# Altium footprint library SamacSys.PcbLib: 1008 footprints (part 8 of 63)
Each footprint in its own frame and in the unit in brackets; x right, y up, seen from the top. Pads: shape width x height; smd on the part's side, far side on the other; paste and mask are expansions set on the pad; w line width, h text height; cw(c..) or ccw(c..) is an arc to the next point about the centre after c.
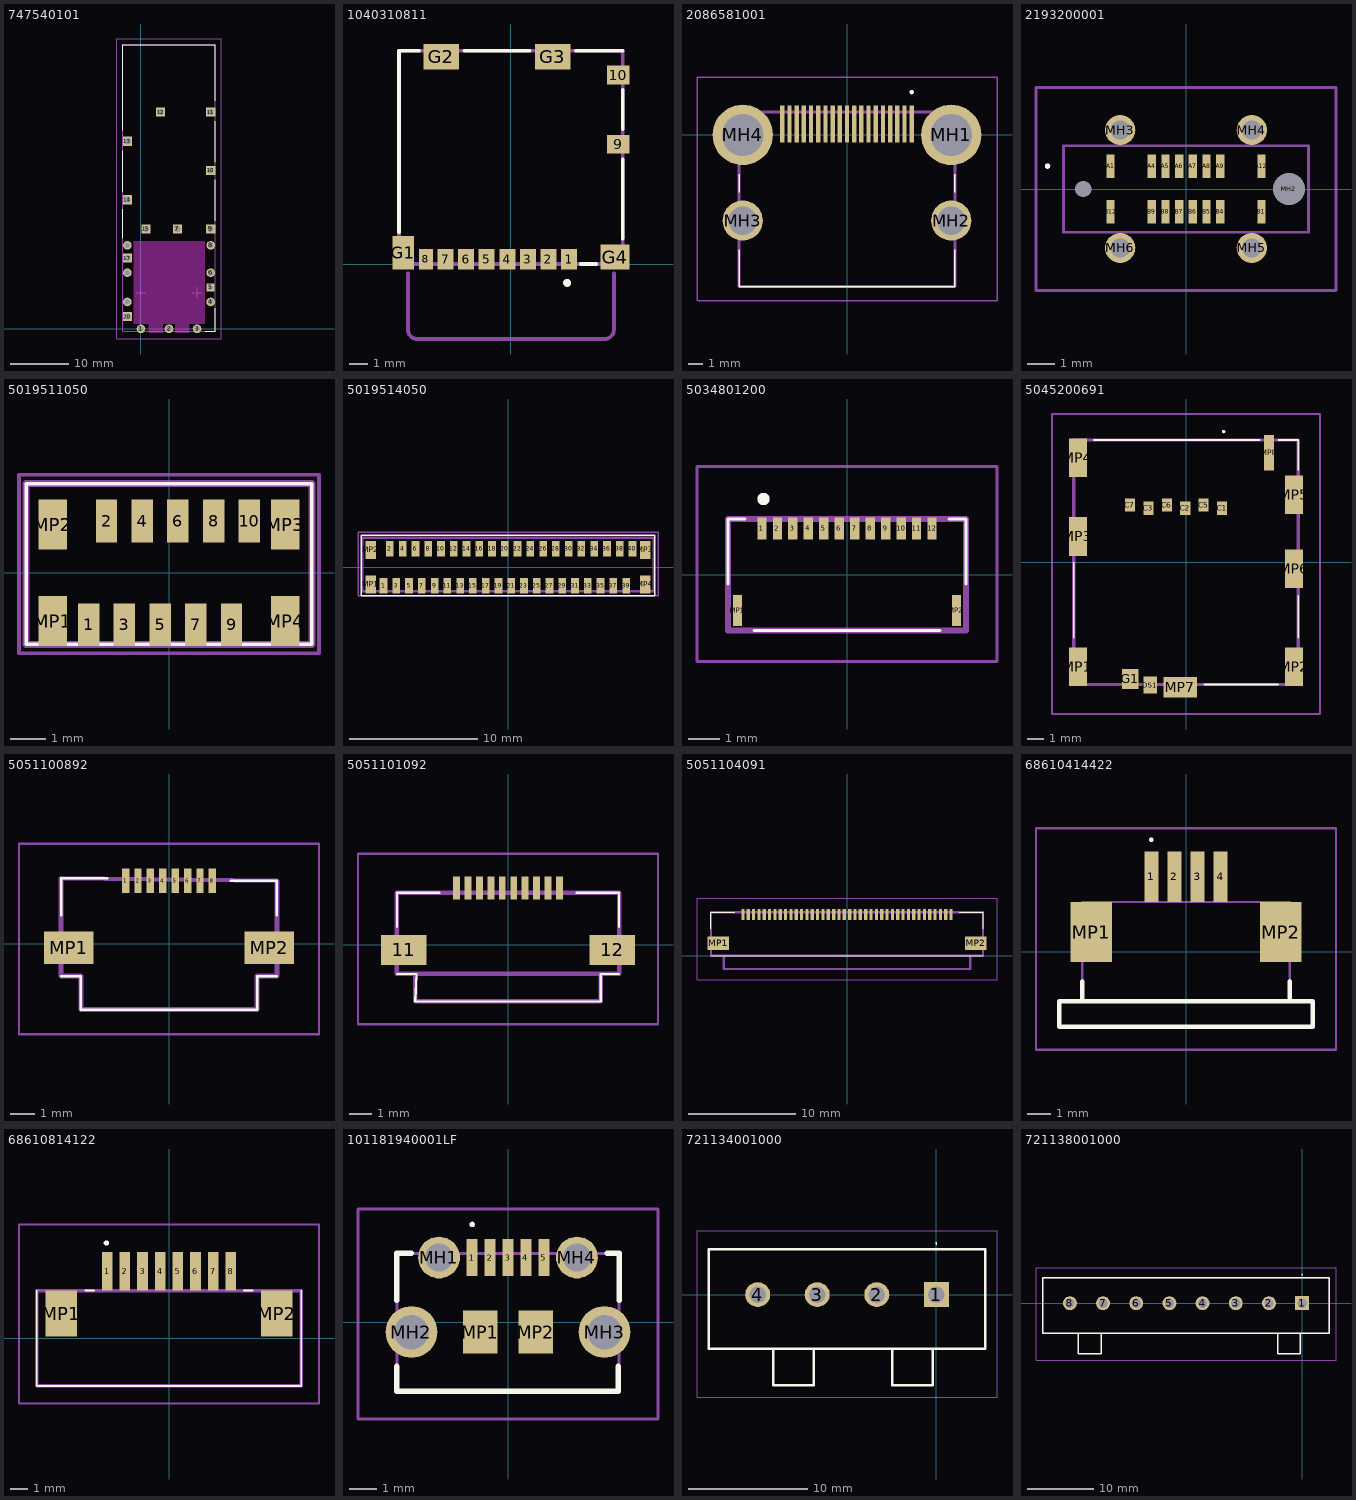
[diagram p7: the footprints below, top view; thin cyan lines are the x and y axes]

## 747540101 [mm]
pads (20):
  round 1.478 hole 0.95: 1(0,0) 2(4.8,0) 3(9.6,0) 4(11.93,4.6) 6(11.93,9.6) 8(11.93,14.3) 16(-2.32,14.3) 18(-2.32,9.6) 19(-2.32,4.6)
  rect 1.381x1.381 hole 0.85: 5(11.93,7.1)
  rect 1.575x1.575 hole 1.05: 7(6.25,17.1) 9(11.93,17.1) 10(11.93,27.1) 11(11.93,37.1) 12(3.35,37.1) 13(-2.32,32.1) 14(-2.32,22.1) 15(0.85,17.1) 17(-2.32,12.1) 20(-2.32,2.1)
Top Layer keep-out:
  rectangle: 5.8,-0.7 8.3,0.8
  rectangle: 1.3,-0.7 3.8,0.8
  rectangle: -1.25,0.8 11,15
Top Overlay:
  lines w0.2: -3.15,15.5 -3.15,20.5 ; -3.15,23.5 -3.15,30.5 ; -3.15,34 -3.15,48.6 12.75,48.6 12.75,39 ; 11,-0.4 12.75,-0.4 12.75,3.5 ; 12.75,18.5 12.75,25.5 ; 12.75,28.5 12.75,35.5
Top Assembly:
  lines w0.1: -0.8,6.2 0.8,6.2 ; 0,5.4 0,7 ; 8.8,6.2 10.4,6.2 ; 9.6,5.4 9.6,7
  text "pin1" at 10.475,12.31 h2
  text "pin20" at 10.475,1.053 h2
Assembly:
  lines w0.1: -3.15,-0.4 12.75,-0.4 12.75,48.6 -3.15,48.6 -3.15,-0.4
Countryard:
  lines w0.1: -4.15,-1.739 13.75,-1.739 13.75,49.6 -4.15,49.6 -4.15,-1.739
3D body "747540101.stp": height 10.65, standoff -2.6, extent -3.039,-0.36 12.859,48.635

## 1040310811 [mm]
pads (14):
  rect 0.85x1.1 smd: 1(3.105,0.25) 2(2.005,0.25) 3(0.905,0.25) 4(-0.195,0.25) 5(-1.295,0.25) 6(-2.395,0.25) 7(-3.495,0.25)
  rect 0.75x1.1 smd: 8(-4.545,0.25)
  rect 1.2x1 smd: 9(5.74,6.4) 10(5.74,10.1)
  rect 1.17x1.8 smd: G1(-5.755,0.6)
  rect 1.9x1.35 smd: G2(-3.73,11.075) G3(2.24,11.075)
  rect 1.55x1.35 smd: G4(5.565,0.375)
Top Overlay:
  circle w0.2: c3,-1 r0.113
  lines w0.2: -5.975,1.721 -5.975,11.4 -4.914,11.4 ; -2.5,11.4 1,11.4 ; 3.455,11.4 5.975,11.4 ; 3.739,0 4.56,0 ; 5.975,1.367 5.975,5.601 ; 5.975,7.216 5.975,9.297
Top Assembly:
  lines w0.1: -6,0 6,0 6,11.4 -6,11.4 -6,0
Top Courtyard:
  lines w0.2: -5.5,-0.5 -5.5,-3.5 ccw(c-5,-3.5) -5,-4 5,-4 ccw(c5,-3.5) 5.5,-3.5 5.5,-0.5
  text "SD CARD" at -2,-3.25 h1.5
Assembly:
  lines w0.2: -5.975,0 5.975,0 5.975,11.4 -5.975,11.4 -5.975,0
3D body "104031-0811.stp": height 1.45, standoff 0, extent -5.975,-0.043 5.975,11.357

## 2086581001 [mm]
pads (23):
  rect 0.3x2.6 smd: 1(4.5,0.76) 2(4,0.76) 3(3.5,0.76) 4(3,0.76) 5(2.5,0.76) 6(2,0.76) 7(1.5,0.76) 8(1,0.76) 9(0.5,0.76) 10(0,0.76) 11(-0.5,0.76) 12(-1,0.76) 13(-1.5,0.76) 14(-2,0.76) 15(-2.5,0.76) 16(-3,0.76) 17(-3.5,0.76) 18(-4,0.76) 19(-4.5,0.76)
  round 4.2 hole 2.909: MH1(7.25,0) MH4(-7.25,0)
  round 2.8 hole 1.991: MH2(7.25,-5.96) MH3(-7.25,-5.96)
Top Overlay:
  lines w0.1: -7.5,-10.55 -7.5,-7.975 -7.5,-10.55 ; -7.5,-10.55 7.5,-10.55 ; -7.5,-10.55 7.5,-10.55 ; 7.5,-10.55 7.5,-7.975 7.5,-10.55 ; -7.5,-3.975 -7.5,-2.725 -7.5,-3.975 ; 7.5,-3.975 7.5,-2.725 7.5,-3.975
  lines w0.2: 4.5,2.925 cw(c4.5,2.975) 4.5,3.025 ; 4.5,2.925 ccw(c4.5,2.975) 4.5,3.025 ; 4.5,2.925 cw(c4.5,2.975) 4.5,3.025
Assembly:
  lines w0.2: -7.5,-10.55 -7.5,1.6 7.5,1.6 7.5,-10.55 -7.5,-10.55
Countryard:
  lines w0.1: -10.432,-11.55 -10.432,4.025 10.432,4.025 10.432,-11.55 -10.432,-11.55
3D body "208658-1001.stp": height 6.17, standoff -2.22, extent -7.499,-10.56 7.501,1.59

## 2193200001 [mm]
pads (22):
  rect 0.3x0.85 smd: A1(-2.75,0.835) A4(-1.25,0.835) A5(-0.75,0.835) A6(-0.25,0.835) A7(0.25,0.835) A8(0.75,0.835) A9(1.25,0.835) A12(2.75,0.835) B1(2.75,-0.835) B4(1.25,-0.835) B5(0.75,-0.835) B6(0.25,-0.835) B7(-0.25,-0.835) B8(-0.75,-0.835) B9(-1.25,-0.835) B12(-2.75,-0.835)
  round 0.3 hole 0.6 unplated: MH1(-3.75,0)
  round 0.585 hole 1.17 unplated: MH2(3.75,0)
  round 1.1 hole 0.7: MH3(-2.4,2.15) MH4(2.4,2.15) MH5(2.4,-2.15) MH6(-2.4,-2.15)
Top Overlay:
  lines w0.1: -5.1,0.835 cw(c-5.05,0.835) -5,0.835 cw(c-5.05,0.835) -5.1,0.835
Assembly:
  lines w0.1: -4.47,-1.58 4.47,-1.58 4.47,1.58 -4.47,1.58 -4.47,-1.58
Countryard:
  lines w0.1: -5.47,-3.7 5.47,-3.7 5.47,3.7 -5.47,3.7 -5.47,-3.7
3D body "219320-0001.stp": height 8.79, standoff -1.11, extent -4.47,-2.3 4.47,2.3

## 5019511050 [mm]
pads (14):
  rect 0.6x1.2 smd: 1(-2.25,-1.45) 2(-1.75,1.45) 3(-1.25,-1.45) 4(-0.75,1.45) 5(-0.25,-1.45) 6(0.25,1.45) 7(0.75,-1.45) 8(1.25,1.45) 9(1.75,-1.45) 10(2.25,1.45)
  rect 0.8x1.4 smd: MP1(-3.25,-1.35) MP2(-3.25,1.35) MP3(3.25,1.35) MP4(3.25,-1.35)
Top Overlay:
  lines w0.1: -4,-2 -4,2.5 4,2.5 4,-2 -4,-2
Assembly:
  lines w0.2: -4,-2 -4,2.5 4,2.5 4,-2 -4,-2
Countryard:
  lines w0.1: -4.2,-2.25 -4.2,2.75 4.2,2.75 4.2,-2.25 -4.2,-2.25
3D body "5019511050.stp": height 4.28, standoff -0.06, extent -3.9,-1.85 3.9,2.284

## 5019514050 [mm]
pads (44):
  rect 0.6x1.2 smd: 1(-9.75,-1.45) 2(-9.25,1.45) 3(-8.75,-1.45) 4(-8.25,1.45) 5(-7.75,-1.45) 6(-7.25,1.45) 7(-6.75,-1.45) 8(-6.25,1.45) 9(-5.75,-1.45) 10(-5.25,1.45) 11(-4.75,-1.45) 12(-4.25,1.45) 13(-3.75,-1.45) 14(-3.25,1.45) 15(-2.75,-1.45) 16(-2.25,1.45) 17(-1.75,-1.45) 18(-1.25,1.45) 19(-0.75,-1.45) 20(-0.25,1.45) 21(0.25,-1.45) 22(0.75,1.45) 23(1.25,-1.45) 24(1.75,1.45) 25(2.25,-1.45) 26(2.75,1.45) 27(3.25,-1.45) 28(3.75,1.45) 29(4.25,-1.45) 30(4.75,1.45) 31(5.25,-1.45) 32(5.75,1.45) 33(6.25,-1.45) 34(6.75,1.45) 35(7.25,-1.45) 36(7.75,1.45) 37(8.25,-1.45) 38(8.75,1.45) 39(9.25,-1.45) 40(9.75,1.45)
  rect 0.8x1.4 smd: MP1(-10.75,-1.35) MP2(-10.75,1.35) MP3(10.75,1.35) MP4(10.75,-1.35)
Top Overlay:
  lines w0.1: -11.5,-2.25 -11.5,2.5 11.5,2.5 11.5,-2.25 -11.5,-2.25
Assembly:
  lines w0.2: -11.4,2.2 -11.4,-1.9 ; 11.4,2.2 11.4,-1.9 ; -11.4,-1.9 -3.6,-1.9 ; -11.4,-1.9 -11.4,2.3 11.4,2.3 11.4,-1.9 ; -11.4,-1.9 -3.6,-1.9 ; -3.6,-1.9 11.4,-1.9
Countryard:
  lines w0.1: -11.75,-2.25 11.75,-2.25 11.75,2.75 -11.75,2.75 -11.75,-2.25
3D body "5019514050.stp": height 4.54, standoff -0.06, extent -11.4,-1.85 11.4,2.284

## 5034801200 [mm]
pads (14):
  rect 0.3x0.7 smd: 1(-2.75,1.5) 2(-2.25,1.5) 3(-1.75,1.5) 4(-1.25,1.5) 5(-0.75,1.5) 6(-0.25,1.5) 7(0.25,1.5) 8(0.75,1.5) 9(1.25,1.5) 10(1.75,1.5) 11(2.25,1.5) 12(2.75,1.5)
  rect 0.3x1 smd: MP1(-3.54,-1.15) MP2(3.54,-1.15)
Top Overlay:
  lines w0.1: -3.85,-0.3 -3.85,1.8 -3.3,1.8 ; -3,-1.8 3,-1.8 ; 3.3,1.8 3.85,1.8 3.85,-0.3
  lines w0.3: -2.7,2.4 cw(c-2.7,2.45) -2.7,2.5 cw(c-2.7,2.45) -2.7,2.4
Assembly:
  lines w0.2: -3.85,-1.8 3.85,-1.8 3.85,1.8 -3.85,1.8 -3.85,-1.8
Countryard:
  lines w0.1: -4.85,-2.8 4.85,-2.8 4.85,3.5 -4.85,3.5 -4.85,-2.8
3D body "503480-1200.stp": height 1.87, standoff 0, extent -3.85,-2.09 3.85,1.51

## 5045200691 [mm]
pads (16):
  rect 0.6x0.8 smd: C1(2.155,3.215) C2(-0.045,3.215) C3(-2.245,3.215) C5(1.055,3.415) C6(-1.145,3.415) C7(-3.345,3.415)
  rect 0.8x1 smd: DS1(-2.13,-7.335)
  rect 1x1.2 smd: G1(-3.33,-6.965)
  rect 1.1x2.3 smd: MP1(-6.45,-6.235) MP2(6.45,-6.235) MP3(-6.45,1.535) MP4(-6.45,6.235) MP5(6.45,4.015) MP6(6.45,-0.385)
  rect 2x1.2 smd: MP7(-0.33,-7.465)
  rect 0.6x2.1 smd: MP8(4.96,6.535)
Top Overlay:
  lines w0.1: -6.7,-4.5 -6.7,0 ; -5.5,7.3 4.4,7.3 ; 1.1,-7.3 5.5,-7.3 ; 5.5,7.3 6.7,7.3 6.7,5.5 ; 6.7,-4.5 6.7,-2 ; 2.2,7.8 cw(c2.25,7.8) 2.3,7.8 cw(c2.25,7.8) 2.2,7.8
Assembly:
  lines w0.2: -6.7,-7.3 -6.7,7.3 6.7,7.3 6.7,-7.3 -6.7,-7.3
Countryard:
  lines w0.1: -8,-9.065 -8,8.85 8,8.85 8,-9.065 -8,-9.065
3D body "504520-0691.stp": height 1.28, standoff 0, extent -6.701,-7.656 6.699,7.444

## 5051100892 [mm]
pads (10):
  rect 0.3x1 smd: 1(-1.75,2.55) 2(-1.25,2.55) 3(-0.75,2.55) 4(-0.25,2.55) 5(0.25,2.55) 6(0.75,2.55) 7(1.25,2.55) 8(1.75,2.55)
  rect 2x1.3 smd: MP1(-4.05,-0.15) MP2(4.05,-0.15)
Top Overlay:
  lines w0.1: -4.35,-1.3 -3.55,-1.3 -3.55,-2.65 3.55,-2.65 3.55,-1.3 4.35,-1.3 ; -4.35,1.15 -4.35,2.65 -2.5,2.65 ; 2.5,2.55 4.35,2.55 4.35,1.15
Assembly:
  lines w0.2: -4.35,-1.3 -4.35,2.65 4.35,2.55 4.35,-1.3 3.55,-1.3 3.55,-2.65 -3.55,-2.65 -3.55,-1.3 -4.35,-1.3
Countryard:
  lines w0.1: -6.05,-3.65 -6.05,4.05 6.05,4.05 6.05,-3.65 -6.05,-3.65
3D body "505110-0892.stp": height 2.2, standoff 0, extent -4.92,-2.65 4.92,3.02

## 5051101092 [mm]
pads (12):
  rect 0.3x1 smd: 1(-2.25,2.475) 2(-1.75,2.475) 3(-1.25,2.475) 4(-0.75,2.475) 5(-0.25,2.475) 6(0.25,2.475) 7(0.75,2.475) 8(1.25,2.475) 9(1.75,2.475) 10(2.25,2.475)
  rect 2x1.3 smd: 11(-4.55,-0.225) 12(4.55,-0.225)
Top Overlay:
  lines w0.1: -4.85,-1.275 -4,-1.275 -4.05,-2.475 4.05,-2.475 4.05,-1.275 4.85,-1.275 ; -4.85,0.775 -4.85,2.275 -3,2.275 ; 3,2.275 4.85,2.275 4.85,0.775
Assembly:
  lines w0.2: -4.05,-1.275 -4.05,-2.475 4.05,-2.475 4.05,-1.275 ; -4.85,-1.275 -4.85,2.275 4.85,2.275 4.85,-1.275 -4.85,-1.275
Countryard:
  lines w0.1: -6.55,-3.475 -6.55,3.975 6.55,3.975 6.55,-3.475 -6.55,-3.475
3D body "505110-1092.stp": height 1.88, standoff -0.02, extent -5.25,-2.58 5.25,2.72

## 5051104091 [mm]
pads (42):
  rect 0.3x1 smd: 1(-9.75,3.85) 2(-9.25,3.85) 3(-8.75,3.85) 4(-8.25,3.85) 5(-7.75,3.85) 6(-7.25,3.85) 7(-6.75,3.85) 8(-6.25,3.85) 9(-5.75,3.85) 10(-5.25,3.85) 11(-4.75,3.85) 12(-4.25,3.85) 13(-3.75,3.85) 14(-3.25,3.85) 15(-2.75,3.85) 16(-2.25,3.85) 17(-1.75,3.85) 18(-1.25,3.85) 19(-0.75,3.85) 20(-0.25,3.85) 21(0.25,3.85) 22(0.75,3.85) 23(1.25,3.85) 24(1.75,3.85) 25(2.25,3.85) 26(2.75,3.85) 27(3.25,3.85) 28(3.75,3.85) 29(4.25,3.85) 30(4.75,3.85) 31(5.25,3.85) 32(5.75,3.85) 33(6.25,3.85) 34(6.75,3.85) 35(7.25,3.85) 36(7.75,3.85) 37(8.25,3.85) 38(8.75,3.85) 39(9.25,3.85) 40(9.75,3.85)
  rect 2x1.3 smd: MP1(-12.05,1.15) MP2(12.05,1.15)
Top Overlay:
  lines w0.1: -12.75,0 12.75,0 ; -12.75,2.5 -12.75,4.05 -10.5,4.05 ; 10.5,4.05 12.75,4.05 12.75,2.5
Assembly:
  lines w0.2: -12.75,0 12.75,0 12.75,4.05 -12.75,4.05 -12.75,0 ; -11.55,-1.25 -11.55,0 11.55,0 11.55,-1.25 -11.55,-1.25
Countryard:
  lines w0.1: -14.05,-2.25 14.05,-2.25 14.05,5.35 -14.05,5.35 -14.05,-2.25
3D body "505110-4091.stp": height 1.88, standoff -0.02, extent -12.75,-1.2 12.75,4.1

## 68610414422 [mm]
pads (6):
  rect 0.6x2.2 smd: 1(-1.5,3.25) 2(-0.5,3.25) 3(0.5,3.25) 4(1.5,3.25)
  rect 1.8x2.6 smd: MP1(-4.1,0.85) MP2(4.1,0.85)
Top Overlay:
  lines w0.1: -1.5,4.8 cw(c-1.5,4.85) -1.5,4.9 cw(c-1.5,4.85) -1.5,4.8
  lines w0.2: -4.5,-1.29 -4.5,-2.15 ; 4.5,-1.29 4.5,-2.15 ; -4.5,-2.15 -5.5,-2.15 -5.5,-3.25 5.5,-3.25 5.5,-2.15 4.5,-2.15 ; -4.5,-2.15 4.5,-2.15
Assembly:
  lines w0.1: -4.5,-2.15 -4.5,2.15 4.5,2.15 4.5,-2.15 ; -5.5,-3.25 5.5,-3.25 5.5,-2.15 -5.5,-2.15 -5.5,-3.25
Countryard:
  lines w0.1: -6.5,-4.25 6.5,-4.25 6.5,5.35 -6.5,5.35 -6.5,-4.25
3D body "68610414422.stp": height 3.01, standoff 0, extent -5.5,-3 5.5,4.1

## 68610814122 [mm]
pads (10):
  rect 0.6x2.2 smd: 1(-3.5,3.8) 2(-2.5,3.8) 3(-1.5,3.8) 4(-0.5,3.8) 5(0.5,3.8) 6(1.5,3.8) 7(2.5,3.8) 8(3.5,3.8)
  rect 1.8x2.6 smd: MP1(-6.1,1.4) MP2(6.1,1.4)
Top Overlay:
  lines w0.1: -7.5,-2.7 -7.5,2.7 -7.5,-2.7 ; -7.5,-2.7 7.5,-2.7 ; -7.5,-2.7 7.5,-2.7 ; 7.5,-2.7 7.5,2.7 7.5,-2.7 ; -4.75,2.7 -4.25,2.7 -4.75,2.7 ; 4.25,2.7 4.75,2.7 4.25,2.7
  lines w0.2: -3.6,5.4 ccw(c-3.55,5.4) -3.5,5.4 ; -3.6,5.4 cw(c-3.55,5.4) -3.5,5.4 ; -3.6,5.4 ccw(c-3.55,5.4) -3.5,5.4
Assembly:
  lines w0.2: -7.5,-2.7 7.5,-2.7 7.5,2.7 -7.5,2.7 -7.5,-2.7
Countryard:
  lines w0.1: -8.5,-3.7 8.5,-3.7 8.5,6.45 -8.5,6.45 -8.5,-3.7
3D body "68610814122.stp": height 4.21, standoff 0, extent -7.5,-2.7 7.5,4.84

## 101181940001LF [mm]
pads (11):
  rect 0.4x1.35 smd: 1(-1.3,2.35) 2(-0.65,2.35) 3(0,2.35) 4(0.65,2.35) 5(1.3,2.35)
  round 1.515 hole 1.01: MH1(-2.5,2.35) MH4(2.5,2.35)
  round 1.875 hole 1.25: MH2(-3.5,-0.35) MH3(3.5,-0.35)
  rect 1.25x1.55 smd: MP1(-1,-0.35) MP2(1,-0.35)
Top Overlay:
  lines w0.1: -1.3,3.5 cw(c-1.3,3.55) -1.3,3.6 cw(c-1.3,3.55) -1.3,3.5
  lines w0.2: -4.025,-1.6 -4.025,-2.5 4,-2.5 4,-1.6 ; -4.025,0.8 -4.025,2.5 -3.5,2.5 ; 3.6,2.5 4.025,2.5 4.025,0.8
Assembly:
  lines w0.1: -4.025,-2.5 -4.025,2.5 4.025,2.5 4.025,-2.5 -4.025,-2.5
Countryard:
  lines w0.1: -5.438,-3.5 -5.438,4.107 5.438,4.107 5.438,-3.5 -5.438,-3.5
3D body "10118194-0001LF.stp": height 2.76, standoff -0.51, extent -4.025,-3.07 4.025,2.51

## 721134001000 [mm]
pads (4):
  rect 2.1x2.1 hole 1.4: 1(0,0)
  round 2.1 hole 1.4: 2(-5,0) 3(-10,0) 4(-15,0)
Top Overlay:
  lines w0.1: -0.05,4.3 ccw(c0,4.3) 0.05,4.3 ccw(c0,4.3) -0.05,4.3
  lines w0.2: -13.7,-4.55 -13.7,-7.6 -10.3,-7.6 -10.3,-4.55 ; -3.7,-4.55 -3.7,-7.6 -0.3,-7.6 -0.3,-4.55 ; -19.1,-4.55 4.1,-4.55 4.1,3.8 -19.1,3.8 -19.1,-4.55
Assembly:
  lines w0.1: -19.1,-4.55 4.1,-4.55 4.1,3.8 -19.1,3.8 -19.1,-4.55
Countryard:
  lines w0.1: -20.1,-8.6 5.1,-8.6 5.1,5.35 -20.1,5.35 -20.1,-8.6
3D body "721-134_001-000.stp": height 12, standoff -5, extent -19.1,-7.6 4.1,3.8

## 721138001000 [mm]
pads (8):
  rect 2.1x2.1 hole 1.4: 1(0,0)
  round 2.1 hole 1.4: 2(-5,0) 3(-10,0) 4(-15,0) 5(-20,0) 6(-25,0) 7(-30,0) 8(-35,0)
Top Overlay:
  lines w0.1: -0.05,4.3 ccw(c0,4.3) 0.05,4.3 ccw(c0,4.3) -0.05,4.3
  lines w0.2: -33.7,-4.55 -33.7,-7.6 -30.3,-7.6 -30.3,-4.55 ; -3.7,-4.55 -3.7,-7.6 -0.3,-7.6 -0.3,-4.55 ; -39.1,-4.55 4.1,-4.55 4.1,3.8 -39.1,3.8 -39.1,-4.55
Assembly:
  lines w0.1: -39.1,-4.55 4.1,-4.55 4.1,3.8 -39.1,3.8 -39.1,-4.55
Countryard:
  lines w0.1: -40.1,-8.6 5.1,-8.6 5.1,5.35 -40.1,5.35 -40.1,-8.6
3D body "721-138_001-000.stp": height 12, standoff -5, extent -39.1,-7.6 4.1,3.8